# Altium schematic symbol library ADP150AUJZ-2.65-R7.SchLib: 1 symbol
Pins are listed as number, name and electrical type; pins without a type are passive.

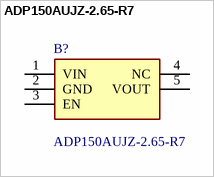
[diagram p0: symbol ADP150AUJZ-2.65-R7]

## ADP150AUJZ-2.65-R7
designator B?
Ultralow Noise, 150 mA CMOS Linear Regulator; Manufacturer_Name: Analog Devices; Geometry.Height: 1mm; Mouser Part Number: 584-ADP150AUJZ2.65R7; Mouser Price/Stock: https://www.mouser.co.uk/ProductDetail/Analog-Devices/ADP150AUJZ-2.65-R7?qs=hpwIUhX6lWzItZWmrCbBUA%3D%3D; Manufacturer_Part_Number: ADP150AUJZ-2.65-R7; Datasheet Link: https://www.analog.com/ADP150/datasheet
footprint SOT95P280X100-5N
pins: 1 VIN, 2 GND, 3 EN, 4 NC, 5 VOUT